# Altium integrated library GPDSE.IntLib: 426 symbols (part 5 of 5)
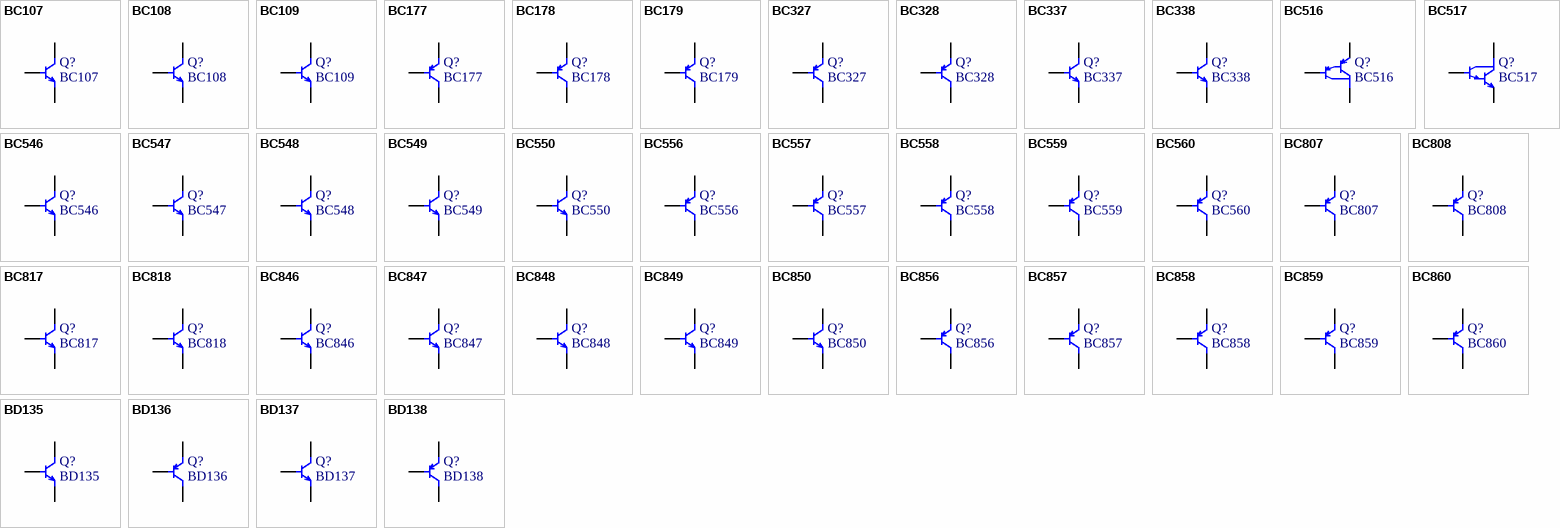
[diagram p30: symbols BC107 to BD138]

## BC109
designator Q?
NPN Bipolar Transistor; Complementary Part: BC179; Collector-Base Voltage (Vcb): 30 V; Collector-Emitter Voltage (Vce): 20 V; Emitter-Base Voltage (Veb): 5 V; Collector Current (Ic): 100 mA; Collector Peak Current (Icp): 200 mA; Total Power Dissipation (Ptot): 300 mW; DC Current Gain Min (hfe): 200; DC Current Gain Max (hfe): 800; Transition Frequency (fT): 100 MHz; Base Peak Current (Ibp): 200 mA
footprint TO-18/EBC (Transistor EBC)
pins: B, C, E

## BC177
designator Q?
PNP Bipolar Transistor; Complementary Part: BC107; Collector-Base Voltage (Vcb): -50 V; Collector-Emitter Voltage (Vce): -45 V; Emitter-Base Voltage (Veb): -5 V; Collector Current (Ic): -100 mA; Collector Peak Current (Icp): -200 mA; Total Power Dissipation (Ptot): 300 mW; DC Current Gain Min (hfe): 125; DC Current Gain Max (hfe): 500; Transition Frequency (fT): 100 MHz; Base Peak Current (Ibp): -200 mA
footprint TO-18/EBC (Transistor EBC)
pins: B, C, E

## BC178
designator Q?
PNP Bipolar Transistor; Complementary Part: BC108; Collector-Base Voltage (Vcb): -30 V; Collector-Emitter Voltage (Vce): -25 V; Emitter-Base Voltage (Veb): -5 V; Collector Current (Ic): -100 mA; Collector Peak Current (Icp): -200 mA; Total Power Dissipation (Ptot): 300 mW; DC Current Gain Min (hfe): 125; DC Current Gain Max (hfe): 500; Transition Frequency (fT): 100 MHz; Base Peak Current (Ibp): -100 mA
footprint TO-18/EBC (Transistor EBC)
pins: B, C, E

## BC179
designator Q?
PNP Bipolar Transistor; Complementary Part: BC109; Collector-Base Voltage (Vcb): -30 V; Collector-Emitter Voltage (Vce): -25 V; Emitter-Base Voltage (Veb): -5 V; Collector Current (Ic): -100 mA; Collector Peak Current (Icp): -200 mA; Total Power Dissipation (Ptot): 300 mW; DC Current Gain Min (hfe): 125; DC Current Gain Max (hfe): 500; Transition Frequency (fT): 100 MHz; Base Peak Current (Ibp): -100 mA
footprint TO-18/EBC (Transistor EBC)
pins: B, C, E

## BC327
designator Q?
PNP Epitaxial Silicon Transistor; Complementary Part: BC337; Collector-Emitter Voltage (Vce): -50 V; Emitter-Base Voltage (Veb): -5 V; Collector Current (Ic): -800 mA; Total Power Dissipation (Ptot): 625 mW; DC Current Gain Min (hfe): 100; DC Current Gain Max (hfe): 630; Transition Frequency (fT): 100 MHz
footprint TO-92/CBE (Transistor Outline Package, Case Style 92 CBE; 3D Sergey Atanov)
pins: B, C, E

## BC328
designator Q?
PNP Epitaxial Silicon Transistor; Complementary Part: BC338; Collector-Emitter Voltage (Vce): -30 V; Emitter-Base Voltage (Veb): -5 V; Collector Current (Ic): -800 mA; Total Power Dissipation (Ptot): 625 mW; DC Current Gain Min (hfe): 40; DC Current Gain Max (hfe): 630; Transition Frequency (fT): 100 MHz
footprint TO-92/CBE (Transistor Outline Package, Case Style 92 CBE; 3D Sergey Atanov)
pins: B, C, E

## BC337
designator Q?
NPN Epitaxial Silicon Transistor; Complementary Part: BC327; Collector-Emitter Voltage (Vce): 50 V; Emitter-Base Voltage (Veb): 5 V; Collector Current (Ic): 800 mA; Total Power Dissipation (Ptot): 625 mW; DC Current Gain Min (hfe): 100; DC Current Gain Max (hfe): 630; Transition Frequency (fT): 100 MHz
footprint TO-92/CBE (Transistor Outline Package, Case Style 92 CBE; 3D Sergey Atanov)
pins: B, C, E

## BC338
designator Q?
NPN Epitaxial Silicon Transistor; Complementary Part: BC328; Collector-Emitter Voltage (Vce): 30 V; Emitter-Base Voltage (Veb): 5 V; Collector Current (Ic): 800 mA; Total Power Dissipation (Ptot): 625 mW; DC Current Gain Min (hfe): 60; DC Current Gain Max (hfe): 630; Transition Frequency (fT): 100 MHz
footprint TO-92/CBE (Transistor Outline Package, Case Style 92 CBE; 3D Sergey Atanov)
pins: B, C, E

## BC516
designator Q?
PNP Darlington Transistor; Complementary Part: BC517; Collector-Emitter Voltage (Vce): -30 V; Collector-Base Voltage (Vcb): -40 V; Emitter-Base Voltage (Veb): -10 V; DC Current Gain Min (hfe): 30.000; Power Dissipation (Pd): 625 mW; Transition Frequency (fT): 200 MHz; Collector Current (Ic): -1 A
footprint TO-92/CBE (Transistor Outline Package, Case Style 92 CBE; 3D Sergey Atanov)
pins: B, C, E

## BC517
designator Q?
NPN Darlington Transistor; Complementary Part: BC516; Collector-Emitter Voltage (Vce): 30 V; Collector-Base Voltage (Vcb): 40 V; Emitter-Base Voltage (Veb): 10 V; DC Current Gain Min (hfe): 30.000; Power Dissipation (Pd): 625 mW; Collector Current (Ic): 1.2 A
footprint TO-92/CBE (Transistor Outline Package, Case Style 92 CBE; 3D Sergey Atanov)
pins: B, C, E

## BC546
designator Q?
NPN Epitaxial Silicon Transistor; Complementary Part: BC556; Collector-Base Voltage (Vcb): 80 V; Collector-Emitter Voltage (Vce): 65 V; Emitter-Base Voltage (Veb): 6 V; Collector Current (Ic): 100 mA; Total Power Dissipation (Ptot): 500 mW; DC Current Gain Min (hfe): 110; DC Current Gain Max (hfe): 800; Transition Frequency (fT): 300 MHz
footprint TO-92/CBE (Transistor Outline Package, Case Style 92 CBE; 3D Sergey Atanov)
pins: B, C, E

## BC547
designator Q?
NPN Epitaxial Silicon Transistor; Complementary Part: BC557; Collector-Base Voltage (Vcb): 50 V; Collector-Emitter Voltage (Vce): 45 V; Emitter-Base Voltage (Veb): 6 V; Collector Current (Ic): 100 mA; Total Power Dissipation (Ptot): 500 mW; DC Current Gain Min (hfe): 110; DC Current Gain Max (hfe): 800; Transition Frequency (fT): 300 MHz
footprint TO-92/CBE (Transistor Outline Package, Case Style 92 CBE; 3D Sergey Atanov)
pins: B, C, E

## BC548
designator Q?
NPN Epitaxial Silicon Transistor; Complementary Part: BC558; Collector-Base Voltage (Vcb): 30 V; Emitter-Base Voltage (Veb): 5 V; Collector Current (Ic): 100 mA; Total Power Dissipation (Ptot): 500 mW; DC Current Gain Min (hfe): 110; DC Current Gain Max (hfe): 800; Transition Frequency (fT): 300 MHz; Collector-Emitter Voltage (Vce): 30 V
footprint TO-92/CBE (Transistor Outline Package, Case Style 92 CBE; 3D Sergey Atanov)
pins: B, C, E

## BC549
designator Q?
NPN Epitaxial Silicon Transistor; Complementary Part: BC559; Collector-Base Voltage (Vcb): 30 V; Emitter-Base Voltage (Veb): 5 V; Collector Current (Ic): 100 mA; Total Power Dissipation (Ptot): 500 mW; DC Current Gain Min (hfe): 110; DC Current Gain Max (hfe): 800; Transition Frequency (fT): 300 MHz; Collector-Emitter Voltage (Vce): 30 V
footprint TO-92/CBE (Transistor Outline Package, Case Style 92 CBE; 3D Sergey Atanov)
pins: B, C, E

## BC550
designator Q?
NPN Epitaxial Silicon Transistor; Complementary Part: BC560; Collector-Base Voltage (Vcb): 50 V; Collector-Emitter Voltage (Vce): 45 V; Emitter-Base Voltage (Veb): 5 V; Collector Current (Ic): 100 mA; Total Power Dissipation (Ptot): 500 mW; DC Current Gain Min (hfe): 110; DC Current Gain Max (hfe): 800; Transition Frequency (fT): 300 MHz
footprint TO-92/CBE (Transistor Outline Package, Case Style 92 CBE; 3D Sergey Atanov)
pins: B, C, E

## BC556
designator Q?
PNP Epitaxial Silicon Transistor; Complementary Part: BC546; Collector-Base Voltage (Vcb): -80 V; Collector-Emitter Voltage (Vce): -65 V; Emitter-Base Voltage (Veb): -5 V; Collector Current (Ic): -100 mA; Total Power Dissipation (Ptot): 500 mW; DC Current Gain Min (hfe): 110; DC Current Gain Max (hfe): 800; Transition Frequency (fT): 150 MHz
footprint TO-92/CBE (Transistor Outline Package, Case Style 92 CBE; 3D Sergey Atanov)
pins: B, C, E

## BC557
designator Q?
PNP Epitaxial Silicon Transistor; Complementary Part: BC547; Collector-Base Voltage (Vcb): -50 V; Collector-Emitter Voltage (Vce): -45 V; Emitter-Base Voltage (Veb): -5 V; Collector Current (Ic): -100 mA; Total Power Dissipation (Ptot): 500 mW; DC Current Gain Min (hfe): 110; DC Current Gain Max (hfe): 800; Transition Frequency (fT): 150 MHz
footprint TO-92/CBE (Transistor Outline Package, Case Style 92 CBE; 3D Sergey Atanov)
pins: B, C, E

## BC558
designator Q?
PNP Epitaxial Silicon Transistor; Complementary Part: BC548; Collector-Base Voltage (Vcb): -30 V; Emitter-Base Voltage (Veb): -5 V; Collector Current (Ic): -100 mA; Total Power Dissipation (Ptot): 500 mW; DC Current Gain Min (hfe): 110; DC Current Gain Max (hfe): 800; Transition Frequency (fT): 150 MHz; Collector-Emitter Voltage (Vce): -30 V
footprint TO-92/CBE (Transistor Outline Package, Case Style 92 CBE; 3D Sergey Atanov)
pins: B, C, E

## BC559
designator Q?
PNP Epitaxial Silicon Transistor; Complementary Part: BC549; Collector-Base Voltage (Vcb): -30 V; Emitter-Base Voltage (Veb): -5 V; Collector Current (Ic): -100 mA; Total Power Dissipation (Ptot): 500 mW; DC Current Gain Min (hfe): 110; DC Current Gain Max (hfe): 800; Transition Frequency (fT): 150 MHz; Collector-Emitter Voltage (Vce): -30 V
footprint TO-92/CBE (Transistor Outline Package, Case Style 92 CBE; 3D Sergey Atanov)
pins: B, C, E

## BC560
designator Q?
PNP Epitaxial Silicon Transistor; Complementary Part: BC550; Collector-Base Voltage (Vcb): -50 V; Collector-Emitter Voltage (Vce): -45 V; Emitter-Base Voltage (Veb): -5 V; Collector Current (Ic): -100 mA; Total Power Dissipation (Ptot): 500 mW; DC Current Gain Min (hfe): 110; DC Current Gain Max (hfe): 800; Transition Frequency (fT): 150 MHz
footprint TO-92/CBE (Transistor Outline Package, Case Style 92 CBE; 3D Sergey Atanov)
pins: B, C, E

## BC807
designator Q?
PNP Epitaxial Silicon Transistor; Complementary Part: BC817; Collector-Base Voltage (Vcb): -50 V; Collector-Emitter Voltage (Vce): -45 V; Emitter-Base Voltage (Veb): -5 V; Collector Current (Ic): -800 mA; Total Power Dissipation (Ptot): 310 mW; DC Current Gain Min (hfe): 60; DC Current Gain Max (hfe): 630; Transition Frequency (fT): 100 MHz
footprint SOT-23/3 (Small Outline Transistor 3 leads); pin to pad B>1 C>3 E>2
pins: B, C, E

## BC808
designator Q?
PNP Epitaxial Silicon Transistor; Complementary Part: BC818; Collector-Base Voltage (Vcb): -30 V; Collector-Emitter Voltage (Vce): -25 V; Emitter-Base Voltage (Veb): -5 V; Collector Current (Ic): -800 mA; Total Power Dissipation (Ptot): 310 mW; DC Current Gain Min (hfe): 60; DC Current Gain Max (hfe): 630; Transition Frequency (fT): 100 MHz
footprint SOT-23/3 (Small Outline Transistor 3 leads); pin to pad B>1 C>3 E>2
pins: B, C, E

## BC817
designator Q?
NPN Epitaxial Silicon Transistor; Complementary Part: BC807; Collector-Base Voltage (Vcb): 50 V; Collector-Emitter Voltage (Vce): 45 V; Emitter-Base Voltage (Veb): 5 V; Collector Current (Ic): 800 mA; Total Power Dissipation (Ptot): 310 mW; DC Current Gain Min (hfe): 60; DC Current Gain Max (hfe): 630; Transition Frequency (fT): 100 MHz
footprint SOT-23/3 (Small Outline Transistor 3 leads); pin to pad B>1 C>3 E>2
pins: B, C, E

## BC818
designator Q?
NPN Epitaxial Silicon Transistor; Complementary Part: BC808; Collector-Base Voltage (Vcb): 30 V; Collector-Emitter Voltage (Vce): 25 V; Emitter-Base Voltage (Veb): 5 V; Collector Current (Ic): 800 mA; Total Power Dissipation (Ptot): 310 mW; DC Current Gain Min (hfe): 60; DC Current Gain Max (hfe): 630; Transition Frequency (fT): 100 MHz
footprint SOT-23/3 (Small Outline Transistor 3 leads); pin to pad B>1 C>3 E>2
pins: B, C, E

## BC846
designator Q?
NPN Epitaxial Silicon Transistor; Complementary Part: BC856; Collector-Base Voltage (Vcb): 80 V; Collector-Emitter Voltage (Vce): 65 V; Emitter-Base Voltage (Veb): 6 V; Collector Current (Ic): 100 mA; Total Power Dissipation (Ptot): 310 mW; DC Current Gain Min (hfe): 110; DC Current Gain Max (hfe): 800; Transition Frequency (fT): 300 MHz
footprint SOT-23/3 (Small Outline Transistor 3 leads); pin to pad B>1 C>3 E>2
pins: B, C, E

## BC847
designator Q?
NPN Epitaxial Silicon Transistor; Complementary Part: BC857; Collector-Base Voltage (Vcb): 50 V; Collector-Emitter Voltage (Vce): 45 V; Emitter-Base Voltage (Veb): 6 V; Collector Current (Ic): 100 mA; Total Power Dissipation (Ptot): 310 mW; DC Current Gain Min (hfe): 110; DC Current Gain Max (hfe): 800; Transition Frequency (fT): 300 MHz
footprint SOT-23/3 (Small Outline Transistor 3 leads); pin to pad B>1 C>3 E>2
pins: B, C, E

## BC848
designator Q?
NPN Epitaxial Silicon Transistor; Complementary Part: BC858; Collector-Base Voltage (Vcb): 30 V; Emitter-Base Voltage (Veb): 5 V; Collector Current (Ic): 100 mA; Total Power Dissipation (Ptot): 310 mW; DC Current Gain Min (hfe): 110; DC Current Gain Max (hfe): 800; Transition Frequency (fT): 300 MHz; Collector-Emitter Voltage (Vce): 30 V
footprint SOT-23/3 (Small Outline Transistor 3 leads); pin to pad B>1 C>3 E>2
pins: B, C, E

## BC849
designator Q?
NPN Epitaxial Silicon Transistor; Complementary Part: BC859; Collector-Base Voltage (Vcb): 30 V; Emitter-Base Voltage (Veb): 5 V; Collector Current (Ic): 100 mA; Total Power Dissipation (Ptot): 310 mW; DC Current Gain Min (hfe): 110; DC Current Gain Max (hfe): 800; Transition Frequency (fT): 300 MHz; Collector-Emitter Voltage (Vce): 30 V
footprint SOT-23/3 (Small Outline Transistor 3 leads); pin to pad B>1 C>3 E>2
pins: B, C, E

## BC850
designator Q?
NPN Epitaxial Silicon Transistor; Complementary Part: BC860; Collector-Base Voltage (Vcb): 50 V; Collector-Emitter Voltage (Vce): 45 V; Emitter-Base Voltage (Veb): 5 V; Collector Current (Ic): 100 mA; Total Power Dissipation (Ptot): 310 mW; DC Current Gain Min (hfe): 110; DC Current Gain Max (hfe): 800; Transition Frequency (fT): 300 MHz
footprint SOT-23/3 (Small Outline Transistor 3 leads); pin to pad B>1 C>3 E>2
pins: B, C, E

## BC856
designator Q?
PNP Epitaxial Silicon Transistor; Complementary Part: BC846; Collector-Base Voltage (Vcb): -80 V; Collector-Emitter Voltage (Vce): -65 V; Emitter-Base Voltage (Veb): -5 V; Collector Current (Ic): -100 mA; Total Power Dissipation (Ptot): 310 mW; DC Current Gain Min (hfe): 110; DC Current Gain Max (hfe): 800; Transition Frequency (fT): 150 MHz
footprint SOT-23/3 (Small Outline Transistor 3 leads); pin to pad B>1 C>3 E>2
pins: B, C, E

## BC857
designator Q?
PNP Epitaxial Silicon Transistor; Complementary Part: BC847; Collector-Base Voltage (Vcb): -50 V; Collector-Emitter Voltage (Vce): -45 V; Emitter-Base Voltage (Veb): -5 V; Collector Current (Ic): -100 mA; Total Power Dissipation (Ptot): 310 mW; DC Current Gain Min (hfe): 110; DC Current Gain Max (hfe): 800; Transition Frequency (fT): 150 MHz
footprint SOT-23/3 (Small Outline Transistor 3 leads); pin to pad B>1 C>3 E>2
pins: B, C, E

## BC858
designator Q?
PNP Epitaxial Silicon Transistor; Complementary Part: BC848; Collector-Base Voltage (Vcb): -30 V; Emitter-Base Voltage (Veb): -5 V; Collector Current (Ic): -100 mA; Total Power Dissipation (Ptot): 310 mW; DC Current Gain Min (hfe): 110; DC Current Gain Max (hfe): 800; Transition Frequency (fT): 150 MHz; Collector-Emitter Voltage (Vce): -30 V
footprint SOT-23/3 (Small Outline Transistor 3 leads); pin to pad B>1 C>3 E>2
pins: B, C, E

## BC859
designator Q?
PNP Epitaxial Silicon Transistor; Complementary Part: BC849; Collector-Base Voltage (Vcb): -30 V; Emitter-Base Voltage (Veb): -5 V; Collector Current (Ic): -100 mA; Total Power Dissipation (Ptot): 310 mW; DC Current Gain Min (hfe): 110; DC Current Gain Max (hfe): 800; Transition Frequency (fT): 150 MHz; Collector-Emitter Voltage (Vce): -30 V
footprint SOT-23/3 (Small Outline Transistor 3 leads); pin to pad B>1 C>3 E>2
pins: B, C, E

## BC860
designator Q?
PNP Epitaxial Silicon Transistor; Complementary Part: BC850; Collector-Base Voltage (Vcb): -50 V; Collector-Emitter Voltage (Vce): -45 V; Emitter-Base Voltage (Veb): -5 V; Collector Current (Ic): -100 mA; Total Power Dissipation (Ptot): 310 mW; DC Current Gain Min (hfe): 110; DC Current Gain Max (hfe): 800; Transition Frequency (fT): 150 MHz
footprint SOT-23/3 (Small Outline Transistor 3 leads); pin to pad B>1 C>3 E>2
pins: B, C, E

## BD135
designator Q?
NPN Epitaxial Silicon Transistor; Complementary Part: BD136; Collector-Base Voltage (Vcb): 45 V; Emitter-Base Voltage (Veb): 5 V; Collector Current (Ic): 1.5 A; Collector Peak Current (Icp): 3 A; Base Peak Current (Ibp): 0.5 A; Total Power Dissipation (Ptot): 12.5 W; DC Current Gain Min (hfe): 25; DC Current Gain Max (hfe): 250; Collector-Emitter Voltage (Vce): 45 V
footprint TO-126/ECB
pins: B, C, E

## BD136
designator Q?
PNP Epitaxial Silicon Transistor; Collector-Base Voltage (Vcb): -45 V; Emitter-Base Voltage (Veb): -5 V; Collector Current (Ic): -1.5 A; Collector Peak Current (Icp): -3 A; Base Peak Current (Ibp): -0.5 A; Total Power Dissipation (Ptot): 12.5 W; DC Current Gain Min (hfe): 25; DC Current Gain Max (hfe): 250; Collector-Emitter Voltage (Vce): -45 V; Complementary Part: BD136
footprint TO-126/ECB
pins: B, C, E

## BD137
designator Q?
NPN Epitaxial Silicon Transistor; Complementary Part: BD138; Collector-Base Voltage (Vcb): 60 V; Emitter-Base Voltage (Veb): 5 V; Collector Current (Ic): 1.5 A; Collector Peak Current (Icp): 3 A; Base Peak Current (Ibp): 0.5 A; Total Power Dissipation (Ptot): 12.5 W; DC Current Gain Min (hfe): 25; DC Current Gain Max (hfe): 250; Collector-Emitter Voltage (Vce): 60 V
footprint TO-126/ECB
pins: B, C, E

## BD138
designator Q?
PNP Epitaxial Silicon Transistor; Collector-Base Voltage (Vcb): -60 V; Emitter-Base Voltage (Veb): -5 V; Collector Current (Ic): -1.5 A; Collector Peak Current (Icp): -3 A; Base Peak Current (Ibp): -0.5 A; Total Power Dissipation (Ptot): 12.5 W; DC Current Gain Min (hfe): 25; DC Current Gain Max (hfe): 250; Collector-Emitter Voltage (Vce): -60 V; Complementary Part: BD138
footprint TO-126/ECB
pins: B, C, E

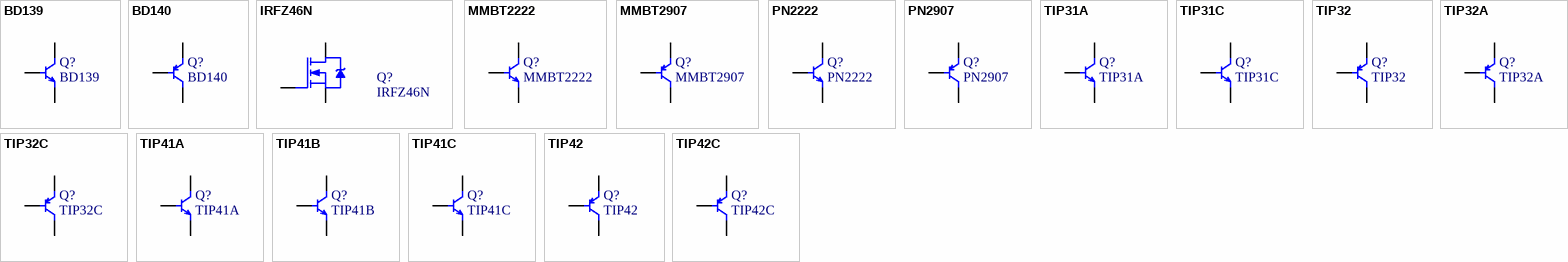
[diagram p19: symbols BD139 to TIP42C]

## BD139
designator Q?
NPN Epitaxial Silicon Transistor; Complementary Part: BD140; Collector-Base Voltage (Vcb): 80 V; Emitter-Base Voltage (Veb): 5 V; Collector Current (Ic): 1.5 A; Collector Peak Current (Icp): 3 A; Base Peak Current (Ibp): 0.5 A; Total Power Dissipation (Ptot): 12.5 W; DC Current Gain Min (hfe): 25; DC Current Gain Max (hfe): 250; Collector-Emitter Voltage (Vce): 80 V
footprint TO-126/ECB
pins: B, C, E

## BD140
designator Q?
PNP Epitaxial Silicon Transistor; Collector-Base Voltage (Vcb): -80 V; Emitter-Base Voltage (Veb): -5 V; Collector Current (Ic): -1.5 A; Collector Peak Current (Icp): -3 A; Base Peak Current (Ibp): -0.5 A; Total Power Dissipation (Ptot): 12.5 W; DC Current Gain Min (hfe): 25; DC Current Gain Max (hfe): 250; Collector-Emitter Voltage (Vce): -80 V; Complementary Part: BD140
footprint TO-126/ECB
pins: B, C, E

## IRFZ46N
designator Q?
HEXFET Power MOSFET; Drain Current (Id): 53 A; Drain Current Peak (Idp): 180 A; Power Dissipation (Pd): 107 W; Gate-to-Source Voltage (Vgs): 20 V; Static Drain-to-Source On-Resistance (Rdson): 16.5 mR; Turn-On Delay (tdon): 14 ns; Rise Time (Rt): 76 ns; Fall Time (Tf): 57 ns; Turn-Off Delay (Tdoff): 52 ns
footprint TO-220/123 (TO, Thru-Hole, Vertical, Heatsink Mounted; 3 In-Line Leads; Pitch 2.54 mm); pin to pad D>2 G>1 S>3
pins: D, G, S

## MMBT2222
designator Q?
NPN Epitaxial Silicon Transistor; Complementary Part: MMBT2907; Collector-Base Voltage (Vcb): 60 V; Collector-Emitter Voltage (Vce): 30 V; Emitter-Base Voltage (Veb): 5 V; Collector Current (Ic): 600 mA; Total Power Dissipation (Ptot): 350 mW; DC Current Gain Min (hfe): 35; DC Current Gain Max (hfe): 300; Transition Frequency (fT): 300 MHz
footprint SOT-23/3 (Small Outline Transistor 3 leads); pin to pad B>1 C>3 E>2
pins: B, C, E

## MMBT2907
designator Q?
PNP Epitaxial Silicon Transistor; Complementary Part: MMBT2222; Collector-Base Voltage (Vcb): -60 V; Collector-Emitter Voltage (Vce): -40 V; Emitter-Base Voltage (Veb): -5 V; Collector Current (Ic): -800 mA; Total Power Dissipation (Ptot): 350 mW; DC Current Gain Min (hfe): 30; DC Current Gain Max (hfe): 300; Transition Frequency (fT): 300 MHz
footprint SOT-23/3 (Small Outline Transistor 3 leads); pin to pad B>1 C>3 E>2
pins: B, C, E

## PN2222
designator Q?
NPN Epitaxial Silicon Transistor; Complementary Part: PN2907; Collector-Base Voltage (Vcb): 60 V; Collector-Emitter Voltage (Vce): 30 V; Emitter-Base Voltage (Veb): 5 V; Collector Current (Ic): 600 mA; Total Power Dissipation (Ptot): 625 mW; DC Current Gain Min (hfe): 35; DC Current Gain Max (hfe): 300; Transition Frequency (fT): 300 MHz
footprint TO-92/EBC (Transistor Outline Package, Case Style 92 EBC; 3D Sergey Atanov)
pins: B, C, E

## PN2907
designator Q?
PNP Epitaxial Silicon Transistor; Complementary Part: PN2222; Collector-Base Voltage (Vcb): -60 V; Collector-Emitter Voltage (Vce): -40 V; Emitter-Base Voltage (Veb): -5 V; Collector Current (Ic): -800 mA; Total Power Dissipation (Ptot): 625 mW; DC Current Gain Min (hfe): 30; DC Current Gain Max (hfe): 300; Transition Frequency (fT): 300 MHz
footprint TO-92/EBC (Transistor Outline Package, Case Style 92 EBC; 3D Sergey Atanov)
pins: B, C, E

## TIP31A
designator Q?
NPN Epitaxial Silicon Transistor; Complementary Part: TIP32A; Collector-Base Voltage (Vcb): 60 V; Emitter-Base Voltage (Veb): 5 V; Collector Current (Ic): 3 A; Collector Peak Current (Icp): 5 A; Base Peak Current (Ibp): 1 A; Total Power Dissipation (Ptot): 40 W; DC Current Gain Min (hfe): 10; DC Current Gain Max (hfe): 50; Transition Frequency (fT): 3 MHz; Collector-Emitter Voltage (Vce): 60 V
footprint TO-220/BCE (TO, Thru-Hole, Vertical, Heatsink Mounted; 3 In-Line Leads; Pitch 2.54 mm)
pins: B, C, E

## TIP31C
designator Q?
NPN Epitaxial Silicon Transistor; Complementary Part: TIP32C; Collector-Base Voltage (Vcb): 100 V; Emitter-Base Voltage (Veb): 5 V; Collector Current (Ic): 3 A; Collector Peak Current (Icp): 5 A; Base Peak Current (Ibp): 1 A; Total Power Dissipation (Ptot): 40 W; DC Current Gain Min (hfe): 10; DC Current Gain Max (hfe): 50; Transition Frequency (fT): 3 MHz; Collector-Emitter Voltage (Vce): 100 V
footprint TO-220/BCE (TO, Thru-Hole, Vertical, Heatsink Mounted; 3 In-Line Leads; Pitch 2.54 mm)
pins: B, C, E

## TIP32
designator Q?
PNP Epitaxial Silicon Transistor; Complementary Part: TIP31; Collector-Base Voltage (Vcb): -40 V; Emitter-Base Voltage (Veb): -5 V; Collector Current (Ic): -3 A; Collector Peak Current (Icp): -5 A; Total Power Dissipation (Ptot): 40 W; DC Current Gain Min (hfe): 10; DC Current Gain Max (hfe): 50; Transition Frequency (fT): 3 MHz; Collector-Emitter Voltage (Vce): -40 V; Base Peak Current (Ibp): -3 A
footprint TO-220/BCE (TO, Thru-Hole, Vertical, Heatsink Mounted; 3 In-Line Leads; Pitch 2.54 mm)
pins: B, C, E

## TIP32A
designator Q?
PNP Epitaxial Silicon Transistor; Complementary Part: TIP31A; Collector-Base Voltage (Vcb): -60 V; Emitter-Base Voltage (Veb): -5 V; Collector Current (Ic): -3 A; Collector Peak Current (Icp): -5 A; Total Power Dissipation (Ptot): 40 W; DC Current Gain Min (hfe): 10; DC Current Gain Max (hfe): 50; Transition Frequency (fT): 3 MHz; Collector-Emitter Voltage (Vce): -60 V; Base Peak Current (Ibp): -3 A
footprint TO-220/BCE (TO, Thru-Hole, Vertical, Heatsink Mounted; 3 In-Line Leads; Pitch 2.54 mm)
pins: B, C, E

## TIP32C
designator Q?
PNP Epitaxial Silicon Transistor; Complementary Part: TIP31C; Collector-Base Voltage (Vcb): -100 V; Emitter-Base Voltage (Veb): -5 V; Collector Current (Ic): -3 A; Collector Peak Current (Icp): -5 A; Total Power Dissipation (Ptot): 40 W; DC Current Gain Min (hfe): 10; DC Current Gain Max (hfe): 50; Transition Frequency (fT): 3 MHz; Collector-Emitter Voltage (Vce): -100 V; Base Peak Current (Ibp): -3 A
footprint TO-220/BCE (TO, Thru-Hole, Vertical, Heatsink Mounted; 3 In-Line Leads; Pitch 2.54 mm)
pins: B, C, E

## TIP41A
designator Q?
NPN Epitaxial Silicon Transistor; Complementary Part: TIP42A; Collector-Base Voltage (Vcb): 60 V; Emitter-Base Voltage (Veb): 5 V; Collector Current (Ic): 6 A; Collector Peak Current (Icp): 10 A; Base Peak Current (Ibp): 2 A; Total Power Dissipation (Ptot): 65 W; DC Current Gain Min (hfe): 15; DC Current Gain Max (hfe): 75; Transition Frequency (fT): 3 MHz; Collector-Emitter Voltage (Vce): 60 V
footprint TO-220/BCE (TO, Thru-Hole, Vertical, Heatsink Mounted; 3 In-Line Leads; Pitch 2.54 mm)
pins: B, C, E

## TIP41B
designator Q?
NPN Epitaxial Silicon Transistor; Complementary Part: TIP42B; Collector-Base Voltage (Vcb): 80 V; Emitter-Base Voltage (Veb): 5 V; Collector Current (Ic): 6 A; Collector Peak Current (Icp): 10 A; Base Peak Current (Ibp): 2 A; Total Power Dissipation (Ptot): 65 W; DC Current Gain Min (hfe): 15; DC Current Gain Max (hfe): 75; Transition Frequency (fT): 3 MHz; Collector-Emitter Voltage (Vce): 80 V
footprint TO-220/BCE (TO, Thru-Hole, Vertical, Heatsink Mounted; 3 In-Line Leads; Pitch 2.54 mm)
pins: B, C, E

## TIP41C
designator Q?
NPN Epitaxial Silicon Transistor; Complementary Part: TIP42C; Collector-Base Voltage (Vcb): 100 V; Emitter-Base Voltage (Veb): 5 V; Collector Current (Ic): 6 A; Collector Peak Current (Icp): 10 A; Base Peak Current (Ibp): 2 A; Total Power Dissipation (Ptot): 65 W; DC Current Gain Min (hfe): 15; DC Current Gain Max (hfe): 75; Transition Frequency (fT): 3 MHz; Collector-Emitter Voltage (Vce): 100 V
footprint TO-220/BCE (TO, Thru-Hole, Vertical, Heatsink Mounted; 3 In-Line Leads; Pitch 2.54 mm)
pins: B, C, E

## TIP42
designator Q?
PNP Epitaxial Silicon Transistor; Complementary Part: TIP41; Collector-Base Voltage (Vcb): -40 V; Emitter-Base Voltage (Veb): -5 V; Collector Current (Ic): -6 A; Collector Peak Current (Icp): -10 A; Base Peak Current (Ibp): -2 A; Total Power Dissipation (Ptot): 65 W; DC Current Gain Min (hfe): 15; DC Current Gain Max (hfe): 75; Transition Frequency (fT): 3 MHz; Collector-Emitter Voltage (Vce): -40 V
footprint TO-220/BCE (TO, Thru-Hole, Vertical, Heatsink Mounted; 3 In-Line Leads; Pitch 2.54 mm)
pins: B, C, E

## TIP42C
designator Q?
PNP Epitaxial Silicon Transistor; Complementary Part: TIP41C; Collector-Base Voltage (Vcb): -100 V; Emitter-Base Voltage (Veb): -5 V; Collector Current (Ic): -6 A; Collector Peak Current (Icp): -10 A; Base Peak Current (Ibp): -2 A; Total Power Dissipation (Ptot): 65 W; DC Current Gain Min (hfe): 15; DC Current Gain Max (hfe): 75; Transition Frequency (fT): 3 MHz; Collector-Emitter Voltage (Vce): -100 V
footprint TO-220/BCE (TO, Thru-Hole, Vertical, Heatsink Mounted; 3 In-Line Leads; Pitch 2.54 mm)
pins: B, C, E


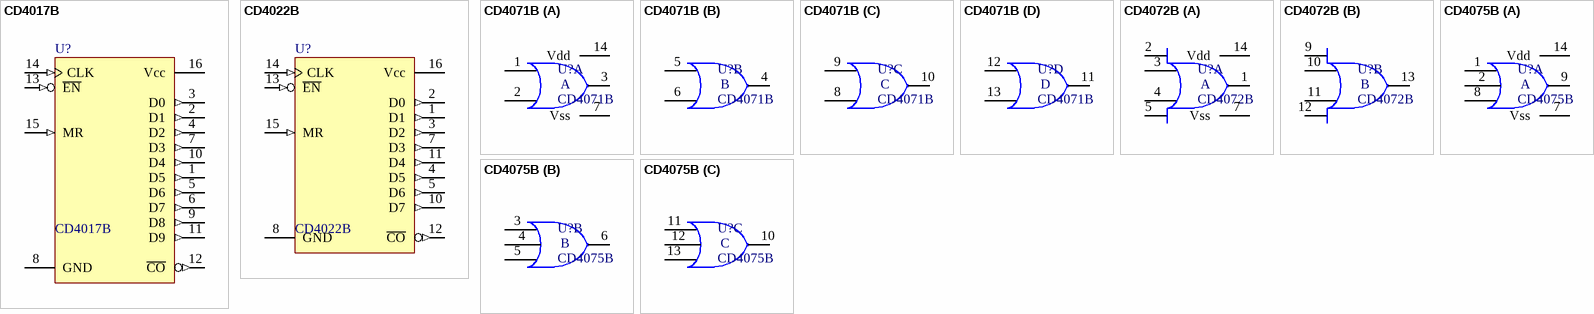
[diagram p20: symbols CD4017B to CD4075B]

## CD4017B
designator U?
CMOS Decade Counter with 10 Decoded Outputs; Supply Voltage (Vcc): 4.75 to 5.25 V; Input Voltage (Vi): 0 to Vcc; Output High Current (Ioh): -0.8 mA; Output Low Current (Iol): 16 mA; Clock Frequency (fclock): 20 MHz; Output Voltage (Vo): 0 to Vcc
footprint DIP16-300(100) (DIP, 16-Leads, Row Spacing 7.62mm, Pitch 2.54mm, Body 22.86x6.35mm)
footprint SOIC16-150(50) (SOIC 16 Leads; Row Spacing 3.81 mm; Pitch 1.27 mm; 3D André L´Hérault)
footprint SOP16-5.3mm(1.27mm) (Small Outline Package 16 pin)
footprint SOP16-4.4mm(0.65mm) (Thin Shrink Small Outline Package 16 pin)
pins: 1 D5 (out), 2 D1 (out), 3 D0 (out), 4 D2 (out), 5 D6 (out), 6 D7 (out), 7 D3 (out), 8 GND (power), 9 D8 (out), 10 D4 (out), 11 D9 (out), 12 ~{CO} (out), 13 ~{EN} (in), 14 CLK (in), 15 MR (in), 16 Vcc (power)

## CD4022B
designator U?
CMOS Octal Counter with 8 Decoded Outputs; Supply Voltage (Vcc): 4.75 to 5.25 V; Input Voltage (Vi): 0 to Vcc; Output High Current (Ioh): -0.8 mA; Output Low Current (Iol): 16 mA; Clock Frequency (fclock): 20 MHz; Output Voltage (Vo): 0 to Vcc
footprint DIP16-300(100) (DIP, 16-Leads, Row Spacing 7.62mm, Pitch 2.54mm, Body 22.86x6.35mm)
footprint SOP16-5.3mm(1.27mm) (Small Outline Package 16 pin)
footprint SOP16-4.4mm(0.65mm) (Thin Shrink Small Outline Package 16 pin)
pins: 1 D1 (out), 2 D0 (out), 3 D2 (out), 4 D5 (out), 5 D6 (out), 7 D3 (out), 8 GND (power), 10 D7 (out), 11 D4 (out), 12 ~{CO} (out), 13 ~{EN} (in), 14 CLK (in), 15 MR (in), 16 Vcc (power)

## CD4071B
designator U?
Quad 2-input OR Gates
footprint DIP14-300(100) (DIP; 14 Leads; Row Spacing 7.62 mm; Pitch 2.54 mm; 3D CircuitWorks)
footprint SOIC14-150(50) (SOIC; 14 Leads; Row Spacing 3.81 mm; Pitch 1.27 mm; 3D Antonio Fagaldo)
footprint SOP14-5.3mm(1.27mm) (Small Outline Package 14 pin)
footprint SOP14-4.4mm(0.65mm) (Thin Shrink Small Outline Package 14 pin)
part A pins: 1 A1, 2 B1, 3 Y1, 7 Vss, 14 Vdd
part B pins: 4 Y2, 5 A2, 6 B2
part C pins: 8 B3, 9 A3, 10 Y3
part D pins: 11 Y4, 12 A4, 13 B4
part A text: A
part B text: B
part C text: C
part D text: D

## CD4072B
designator U?
Dual 4-input OR Gates
footprint DIP14-300(100) (DIP; 14 Leads; Row Spacing 7.62 mm; Pitch 2.54 mm; 3D CircuitWorks)
footprint SOIC14-150(50) (SOIC; 14 Leads; Row Spacing 3.81 mm; Pitch 1.27 mm; 3D Antonio Fagaldo)
footprint SOP14-5.3mm(1.27mm) (Small Outline Package 14 pin)
footprint SOP14-4.4mm(0.65mm) (Thin Shrink Small Outline Package 14 pin)
part A pins: 1 Y1, 2 A1, 3 B1, 4 C1, 5 D1, 7 Vss, 14 Vdd
part B pins: 9 A2, 10 B2, 11 C2, 12 D2, 13 Y2
part A text: A
part B text: B

## CD4075B
designator U?
Triple 3-input OR Gates
footprint DIP14-300(100) (DIP; 14 Leads; Row Spacing 7.62 mm; Pitch 2.54 mm; 3D CircuitWorks)
footprint SOIC14-150(50) (SOIC; 14 Leads; Row Spacing 3.81 mm; Pitch 1.27 mm; 3D Antonio Fagaldo)
footprint SOP14-5.3mm(1.27mm) (Small Outline Package 14 pin)
footprint SOP14-4.4mm(0.65mm) (Thin Shrink Small Outline Package 14 pin)
part A pins: 1 A1, 2 B1, 7 Vss, 8 C1, 9 Y1, 14 Vdd
part B pins: 3 A2, 4 B2, 5 C2, 6 Y2
part C pins: 10 Y3, 11 A3, 12 B3, 13 C3
part A text: A
part B text: B
part C text: C


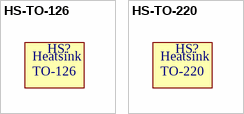
[diagram p21: symbols HS-TO-126 to HS-TO-220]

## HS-TO-126
designator HS?  (value not drawn)
Heatsink TO-126
footprint HS-TO-126-180847 (Heatsink TO-126 180847)
text: Heatsink; TO-126

## HS-TO-220
designator HS?  (value not drawn)
Heatsink TO-220
footprint HS-TO-220-180847 (Heatsink TO-220 180847 180847 19x9.5x19mm)
footprint HS-TO-220-183003-50 (Heatsink TO-220 183003-50 70x21x50mm)
footprint HS-TO-220-183004-37 (Heatsink TO-220 183004-37 86x20x37mm)
text: Heatsink; TO-220


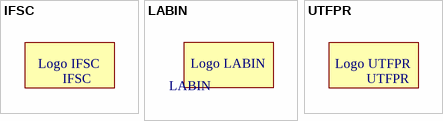
[diagram p22: symbols IFSC to UTFPR]

## IFSC
designator X?
Logomarca IFSC
footprint IFSC_SILK (Logomarca do IFSC)
footprint IFSC_BOTTOM (Logomarca do IFSC)
footprint IFSC_TOP (Logomarca do IFSC)
text: Logo IFSC

## LABIN
designator X?
Logomarca LABIN
footprint LABIN_SILK (Logomarca do LABIN)
footprint LABIN_BOTTOM (Logomarca do LABIN)
footprint LABIN_TOP (Logomarca do LABIN)
text: Logo LABIN

## UTFPR
designator X?
Logomarca UTFPR
footprint UTFPR_SILK (Logomarca da UTFPR)
footprint UTFPR_BOTTOM (Logomarca da UTFPR)
footprint UTFPR_TOP (Logomarca da UTFPR)
text: Logo UTFPR


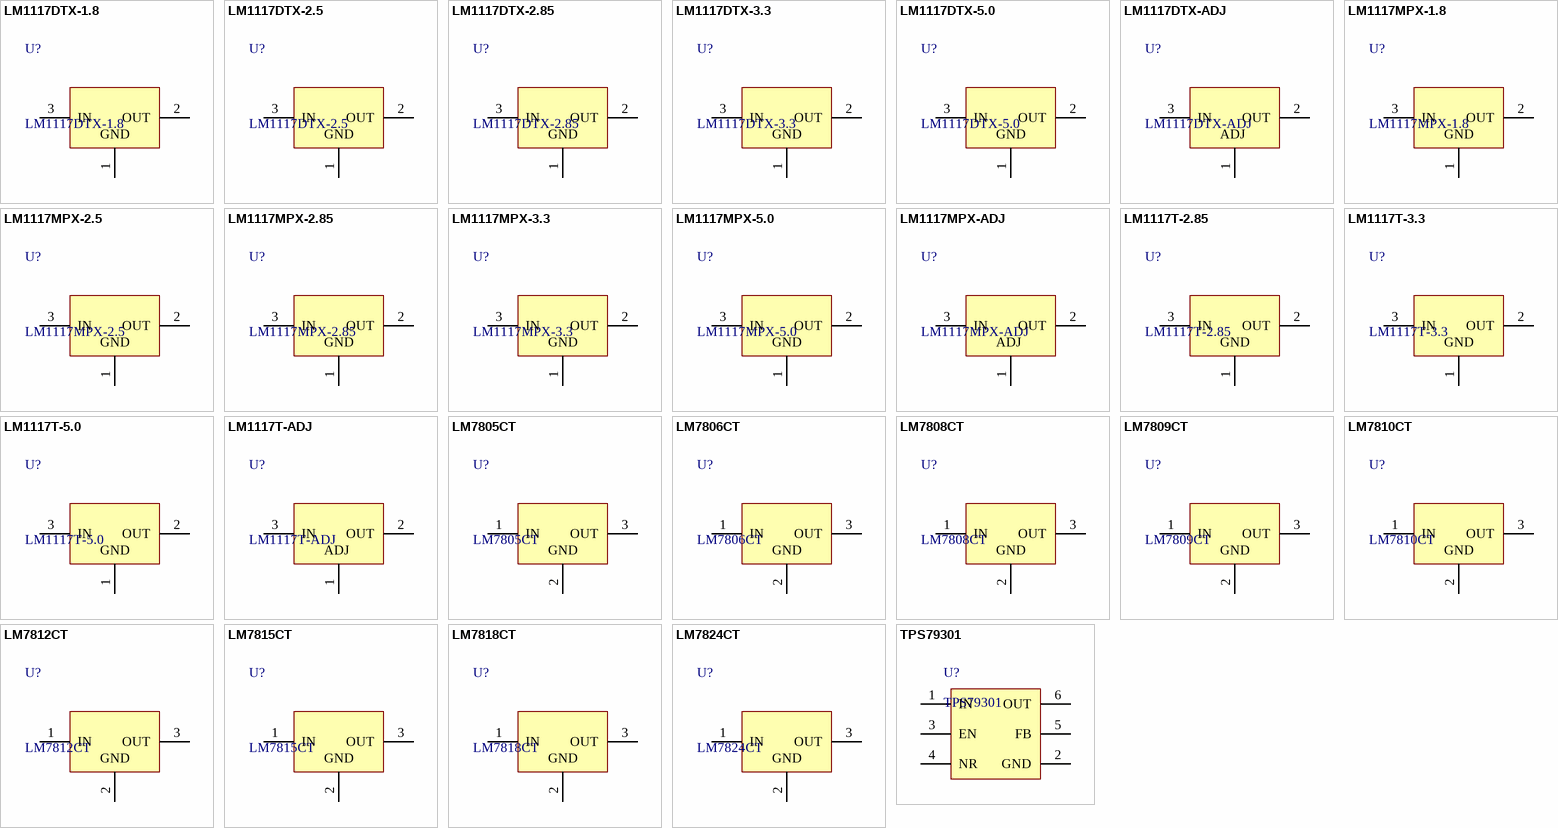
[diagram p23: symbols LM1117DTX-1.8 to TPS79301]

## LM1117DTX-1.8
designator U?
Positive 1.8 V Regulator
footprint TO-252/4 (PowerFLEX Plastic Flange-Mount)
pins: 1 GND, 2 OUT, 3 IN

## LM1117DTX-2.5
designator U?
Positive 2.5 V Regulator
footprint TO-252/4 (PowerFLEX Plastic Flange-Mount)
pins: 1 GND, 2 OUT, 3 IN

## LM1117DTX-2.85
designator U?
Positive 2.85 V Regulator
footprint TO-252/4 (PowerFLEX Plastic Flange-Mount)
pins: 1 GND, 2 OUT, 3 IN

## LM1117DTX-3.3
designator U?
Positive 3.3 V Regulator
footprint TO-252/4 (PowerFLEX Plastic Flange-Mount)
pins: 1 GND, 2 OUT, 3 IN

## LM1117DTX-5.0
designator U?
Positive 5 V Regulator
footprint TO-252/4 (PowerFLEX Plastic Flange-Mount)
pins: 1 GND, 2 OUT, 3 IN

## LM1117DTX-ADJ
designator U?
Positive Adjustable Regulator
footprint TO-252/4 (PowerFLEX Plastic Flange-Mount)
pins: 1 ADJ, 2 OUT, 3 IN

## LM1117MPX-1.8
designator U?
Positive 1.8 V Regulator
footprint SOT-223/4 (SOT-223 DCY)
pins: 1 GND, 2 OUT, 3 IN

## LM1117MPX-2.5
designator U?
Positive 2.5 V Regulator
footprint SOT-223/4 (SOT-223 DCY)
pins: 1 GND, 2 OUT, 3 IN

## LM1117MPX-2.85
designator U?
Positive 2.85 V Regulator
footprint SOT-223/4 (SOT-223 DCY)
pins: 1 GND, 2 OUT, 3 IN

## LM1117MPX-3.3
designator U?
Positive 3.3 V Regulator
footprint SOT-223/4 (SOT-223 DCY)
pins: 1 GND, 2 OUT, 3 IN

## LM1117MPX-5.0
designator U?
Positive 5 V Regulator
footprint SOT-223/4 (SOT-223 DCY)
pins: 1 GND, 2 OUT, 3 IN

## LM1117MPX-ADJ
designator U?
Positive Adjustable Regulator
footprint SOT-223/4 (SOT-223 DCY)
pins: 1 ADJ, 2 OUT, 3 IN

## LM1117T-2.85
designator U?
Positive 2.85 V Regulator
footprint TO-220/123 (TO, Thru-Hole, Vertical, Heatsink Mounted; 3 In-Line Leads; Pitch 2.54 mm)
pins: 1 GND, 2 OUT, 3 IN

## LM1117T-3.3
designator U?
Positive 3.3 V Regulator
footprint TO-220/123 (TO, Thru-Hole, Vertical, Heatsink Mounted; 3 In-Line Leads; Pitch 2.54 mm)
pins: 1 GND, 2 OUT, 3 IN

## LM1117T-5.0
designator U?
Positive 5 V Regulator
footprint TO-220/123 (TO, Thru-Hole, Vertical, Heatsink Mounted; 3 In-Line Leads; Pitch 2.54 mm)
pins: 1 GND, 2 OUT, 3 IN

## LM1117T-ADJ
designator U?
Positive Adjustable Regulator
footprint TO-220/123 (TO, Thru-Hole, Vertical, Heatsink Mounted; 3 In-Line Leads; Pitch 2.54 mm)
pins: 1 ADJ, 2 OUT, 3 IN

## LM7805CT
designator U?
Positive 5 V Regulator; Manufacturer: Fairchild Semiconductor; Regulator Topology: Positive Fixed; Voltage - Output: 5V; Current - Output: 1A; Voltage - Dropout (Typical): 2V @ 1A; Number of Regulators: 1; Voltage - Input: Up to 35V; Supplier 1: Digi-Key; Supplier Part Number 1: LM7805CT-ND; Manufacturer Part Number: LM7805CT; RoHS: RoHS Compliant; Category: Integrated Circuits (ICs); Stock 1: 50483; Pricing 1: 1=0.67, 10=0.566, 25=0.4956, 100=0.4248, 250=0.36816, 500=0.31152, 1000=0.24072, 2500=0.21948, 5000=0.20532 (USD); Packaging: Tube; Current - Limit (Min): -; Operating Temperature: -40°C ~ 125°C; Mounting Type: Through Hole; Package / Case: TO-220-3; Supplier Device Package: TO-220-3; ComponentLink1URL: http://www.fairchildsemi.com/datasheets/LM/LM7805.pdf; ComponentLink1Description: http://www.fairchildsemi.com/datasheets/LM/LM7805.pdf
footprint TO-220/123 (TO, Thru-Hole, Vertical, Heatsink Mounted; 3 In-Line Leads; Pitch 2.54 mm)
pins: 1 IN, 2 GND, 3 OUT

## LM7806CT
designator U?
Positive 6 V Regulator; Manufacturer: Fairchild Semiconductor; Regulator Topology: Positive Fixed; Voltage - Output: 6V; Current - Output: 1A; Voltage - Dropout (Typical): 2V @ 1A; Number of Regulators: 1; Voltage - Input: Up to 35V; Supplier 1: Digi-Key; Supplier Part Number 1: LM7806CT-ND; Manufacturer Part Number: LM7806CT; RoHS: RoHS Compliant; Category: Integrated Circuits (ICs); Stock 1: 1467; Pricing 1: 1=0.7, 10=0.588, 25=0.5144, 100=0.441, 250=0.3822, 500=0.3234, 1000=0.2499, 2500=0.22785, 5000=0.21315 (USD); Packaging: Tube; Current - Limit (Min): -; Operating Temperature: -40°C ~ 125°C; Mounting Type: Through Hole; Package / Case: TO-220-3; Supplier Device Package: TO-220-3; ComponentLink1URL: http://www.fairchildsemi.com/datasheets/LM/LM7805.pdf; ComponentLink1Description: http://www.fairchildsemi.com/datasheets/LM/LM7805.pdf
footprint TO-220/123 (TO, Thru-Hole, Vertical, Heatsink Mounted; 3 In-Line Leads; Pitch 2.54 mm)
pins: 1 IN, 2 GND, 3 OUT

## LM7808CT
designator U?
Positive 8 V Regulator; Manufacturer: Fairchild Semiconductor; Regulator Topology: Positive Fixed; Voltage - Output: 8V; Current - Output: 1A; Voltage - Dropout (Typical): 2V @ 1A; Number of Regulators: 1; Voltage - Input: Up to 35V; Supplier 1: Digi-Key; Supplier Part Number 1: LM7808CTFS-ND; Manufacturer Part Number: LM7808CT; RoHS: RoHS Compliant; Category: Integrated Circuits (ICs); Stock 1: 467; Pricing 1: 1=0.7, 10=0.588, 25=0.5144, 100=0.441, 250=0.3822, 500=0.3234, 1000=0.2499, 2500=0.22785, 5000=0.21315 (USD); Packaging: Tube; Current - Limit (Min): -; Operating Temperature: -40°C ~ 125°C; Mounting Type: Through Hole; Package / Case: TO-220-3; Supplier Device Package: TO-220-3; ComponentLink1URL: http://www.fairchildsemi.com/datasheets/LM/LM7805.pdf; ComponentLink1Description: http://www.fairchildsemi.com/datasheets/LM/LM7805.pdf
footprint TO-220/123 (TO, Thru-Hole, Vertical, Heatsink Mounted; 3 In-Line Leads; Pitch 2.54 mm)
pins: 1 IN, 2 GND, 3 OUT

## LM7809CT
designator U?
Positive 9 V Regulator; Manufacturer: Fairchild Semiconductor; Regulator Topology: Positive Fixed; Voltage - Output: 9V; Current - Output: 1A; Voltage - Dropout (Typical): 2V @ 1A; Number of Regulators: 1; Voltage - Input: Up to 35V; Supplier 1: Digi-Key; Supplier Part Number 1: LM7809CT-ND; Manufacturer Part Number: LM7809CT; RoHS: RoHS Compliant; Category: Integrated Circuits (ICs); Stock 1: 2149; Pricing 1: 1=0.6, 10=0.525, 25=0.4652, 100=0.405, 250=0.35252, 500=0.3, 1000=0.24, 2500=0.2175, 5000=0.2025 (USD); Packaging: Tube; Current - Limit (Min): -; Operating Temperature: -40°C ~ 125°C; Mounting Type: Through Hole; Package / Case: TO-220-3; Supplier Device Package: TO-220-3; ComponentLink1URL: http://www.fairchildsemi.com/datasheets/LM/LM7805.pdf; ComponentLink1Description: http://www.fairchildsemi.com/datasheets/LM/LM7805.pdf
footprint TO-220/123 (TO, Thru-Hole, Vertical, Heatsink Mounted; 3 In-Line Leads; Pitch 2.54 mm)
pins: 1 IN, 2 GND, 3 OUT

## LM7810CT
designator U?
Positive 10 V Regulator; Manufacturer: Fairchild Semiconductor; Regulator Topology: Positive Fixed; Voltage - Output: 10V; Current - Output: 1A; Voltage - Dropout (Typical): 2V @ 1A; Number of Regulators: 1; Voltage - Input: Up to 35V; Supplier 1: Digi-Key; Supplier Part Number 1: LM7810CT-ND; Manufacturer Part Number: LM7810CT; RoHS: RoHS Compliant; Category: Integrated Circuits (ICs); Stock 1: 876; Pricing 1: 1=0.7, 10=0.588, 25=0.5144, 100=0.441, 250=0.3822, 500=0.3234, 1000=0.2499, 2500=0.22785, 5000=0.21315 (USD); Packaging: Tube; Current - Limit (Min): -; Operating Temperature: -40°C ~ 125°C; Mounting Type: Through Hole; Package / Case: TO-220-3; Supplier Device Package: TO-220-3; ComponentLink1URL: http://www.fairchildsemi.com/datasheets/LM/LM7805.pdf; ComponentLink1Description: http://www.fairchildsemi.com/datasheets/LM/LM7805.pdf
footprint TO-220/123 (TO, Thru-Hole, Vertical, Heatsink Mounted; 3 In-Line Leads; Pitch 2.54 mm)
pins: 1 IN, 2 GND, 3 OUT

## LM7812CT
designator U?
Positive 12 V Regulator; Manufacturer: Fairchild Semiconductor; Regulator Topology: Positive Fixed; Voltage - Output: 12V; Current - Output: 1A; Voltage - Dropout (Typical): 2V @ 1A; Number of Regulators: 1; Voltage - Input: Up to 35V; Supplier 1: Digi-Key; Supplier Part Number 1: LM7812CTFS-ND; Manufacturer Part Number: LM7812CT; RoHS: RoHS Compliant; Category: Integrated Circuits (ICs); Stock 1: 6613; Pricing 1: 1=0.7, 10=0.588, 25=0.5144, 100=0.441, 250=0.3822, 500=0.3234, 1000=0.2499, 2500=0.22785, 5000=0.21315 (USD); Packaging: Tube; Current - Limit (Min): -; Operating Temperature: -40°C ~ 125°C; Mounting Type: Through Hole; Package / Case: TO-220-3; Supplier Device Package: TO-220-3; ComponentLink1URL: http://www.fairchildsemi.com/datasheets/LM/LM7805.pdf; ComponentLink1Description: http://www.fairchildsemi.com/datasheets/LM/LM7805.pdf
footprint TO-220/123 (TO, Thru-Hole, Vertical, Heatsink Mounted; 3 In-Line Leads; Pitch 2.54 mm)
pins: 1 IN, 2 GND, 3 OUT

## LM7815CT
designator U?
Positive 15 V Regulator; Manufacturer: Fairchild Semiconductor; Regulator Topology: Positive Fixed; Voltage - Output: 15V; Current - Output: 1A; Voltage - Dropout (Typical): 2V @ 1A; Number of Regulators: 1; Voltage - Input: Up to 35V; Supplier 1: Digi-Key; Supplier Part Number 1: LM7815CTFS-ND; Manufacturer Part Number: LM7815CT; RoHS: RoHS Compliant; Category: Integrated Circuits (ICs); Stock 1: 1594; Pricing 1: 1=0.7, 10=0.588, 25=0.5144, 100=0.441, 250=0.3822, 500=0.3234, 1000=0.2499, 2500=0.22785, 5000=0.21315 (USD); Packaging: Tube; Current - Limit (Min): -; Operating Temperature: -40°C ~ 125°C; Mounting Type: Through Hole; Package / Case: TO-220-3; Supplier Device Package: TO-220-3; ComponentLink1URL: http://www.fairchildsemi.com/datasheets/LM/LM7805.pdf; ComponentLink1Description: http://www.fairchildsemi.com/datasheets/LM/LM7805.pdf
footprint TO-220/123 (TO, Thru-Hole, Vertical, Heatsink Mounted; 3 In-Line Leads; Pitch 2.54 mm)
pins: 1 IN, 2 GND, 3 OUT

## LM7818CT
designator U?
Positive 18 V Regulator; Manufacturer: Fairchild Semiconductor; Regulator Topology: Positive Fixed; Voltage - Output: 18V; Current - Output: 1A; Voltage - Dropout (Typical): 2V @ 1A; Number of Regulators: 1; Voltage - Input: Up to 35V; Supplier 1: Digi-Key; Supplier Part Number 1: LM7818CT-ND; Manufacturer Part Number: LM7818CT; RoHS: RoHS Compliant; Category: Integrated Circuits (ICs); Stock 1: 3844; Pricing 1: 1=0.7, 10=0.588, 25=0.5144, 100=0.441, 250=0.3822, 500=0.3234, 1000=0.2499, 2500=0.22785, 5000=0.21315 (USD); Packaging: Tube; Current - Limit (Min): -; Operating Temperature: -40°C ~ 125°C; Mounting Type: Through Hole; Package / Case: TO-220-3; Supplier Device Package: TO-220-3; ComponentLink1URL: http://www.fairchildsemi.com/datasheets/LM/LM7805.pdf; ComponentLink1Description: http://www.fairchildsemi.com/datasheets/LM/LM7805.pdf
footprint TO-220/123 (TO, Thru-Hole, Vertical, Heatsink Mounted; 3 In-Line Leads; Pitch 2.54 mm)
pins: 1 IN, 2 GND, 3 OUT

## LM7824CT
designator U?
Positive 24 V Regulator; Manufacturer: Fairchild Semiconductor; Regulator Topology: Positive Fixed; Voltage - Output: 24V; Current - Output: 1A; Voltage - Dropout (Typical): 2V @ 1A; Number of Regulators: 1; Voltage - Input: Up to 40V; Supplier 1: Digi-Key; Supplier Part Number 1: LM7824CTFS-ND; Manufacturer Part Number: LM7824CT; RoHS: RoHS Compliant; Category: Integrated Circuits (ICs); Stock 1: 1560; Pricing 1: 1=0.69, 10=0.58, 25=0.508, 100=0.4353, 250=0.37728, 500=0.31922, 1000=0.24667, 2500=0.2249, 5000=0.2104 (USD); Packaging: Tube; Current - Limit (Min): -; Operating Temperature: -40°C ~ 125°C; Mounting Type: Through Hole; Package / Case: TO-220-3; Supplier Device Package: TO-220-3; ComponentLink1URL: http://www.fairchildsemi.com/datasheets/LM/LM7805.pdf; ComponentLink1Description: http://www.fairchildsemi.com/datasheets/LM/LM7805.pdf
footprint TO-220/123 (TO, Thru-Hole, Vertical, Heatsink Mounted; 3 In-Line Leads; Pitch 2.54 mm)
pins: 1 IN, 2 GND, 3 OUT

## TPS79301
designator U?
Low-Noise, High PSRR, RF, 200-mA Low-Dropout Linear Regulators
footprint SOT-23/6 (Small Outline Transistor 6 leads)
pins: 1 IN, 2 GND, 3 EN, 4 NR, 5 FB, 6 OUT


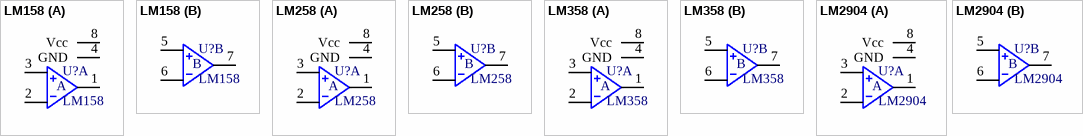
[diagram p24: symbols LM158 to LM2904]

## LM158
designator U?
Dual Operational Amplifier
footprint DIP08-300(100) (DIP; 8 Leads; Row Spacing 7.62 mm; Pitch 2.54 mm)
part A pins: 1 O1, 2 IN1-, 3 IN1+, 4 GND (power), 8 Vcc (power)
part B pins: 5 IN2+, 6 IN2-, 7 O2
part A text: A
part B text: B

## LM258
designator U?
Dual Operational Amplifier
footprint DIP08-300(100) (DIP; 8 Leads; Row Spacing 7.62 mm; Pitch 2.54 mm)
footprint SOIC08-150(50) (Plastic Small Outline 8 pinos)
footprint SOP08-2.9mm(0.65mm) (Small Outline Package 8 pin 2.9 mm large 0.65 mm pitch)
part A pins: 1 O1, 2 IN1-, 3 IN1+, 4 GND (power), 8 Vcc (power)
part B pins: 5 IN2+, 6 IN2-, 7 O2
part A text: A
part B text: B

## LM358
designator U?
Dual Operational Amplifier
footprint DIP08-300(100) (DIP; 8 Leads; Row Spacing 7.62 mm; Pitch 2.54 mm)
footprint SOIC08-150(50) (Plastic Small Outline 8 pinos)
footprint SOP08-2.9mm(0.65mm) (Small Outline Package 8 pin 2.9 mm large 0.65 mm pitch)
footprint SOP08-4.4mm(0.65mm) (Thin Shrink Small Outline Package 8 pin)
footprint SOP08-5.3mm(1.27mm) (Small Outline Package 8 pin)
part A pins: 1 O1, 2 IN1-, 3 IN1+, 4 GND (power), 8 Vcc (power)
part B pins: 5 IN2+, 6 IN2-, 7 O2
part A text: A
part B text: B

## LM2904
designator U?
Dual Operational Amplifier
footprint DIP08-300(100) (DIP; 8 Leads; Row Spacing 7.62 mm; Pitch 2.54 mm)
footprint SOIC08-150(50) (Plastic Small Outline 8 pinos)
footprint SOP08-2.9mm(0.65mm) (Small Outline Package 8 pin 2.9 mm large 0.65 mm pitch)
footprint SOP08-4.4mm(0.65mm) (Thin Shrink Small Outline Package 8 pin)
footprint SOP08-5.3mm(1.27mm) (Small Outline Package 8 pin)
part A pins: 1 O1, 2 IN1-, 3 IN1+, 4 GND (power), 8 Vcc (power)
part B pins: 5 IN2+, 6 IN2-, 7 O2
part A text: A
part B text: B


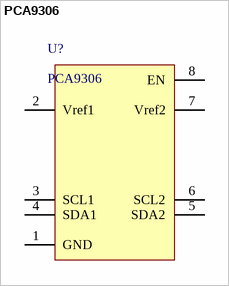
[diagram p25: symbol PCA9306]

## PCA9306
designator U?
Dual Bidirectional I2C Bus and SMBus Voltage-Level Translator; Reference Voltage (Vref): 0 - 5.5 V
footprint SOP08-2.9mm(0.65mm) (Small Outline Package 8 pin 2.9 mm large 0.65 mm pitch)
pins: 1 GND, 2 Vref1, 3 SCL1, 4 SDA1, 5 SDA2, 6 SCL2, 7 Vref2, 8 EN


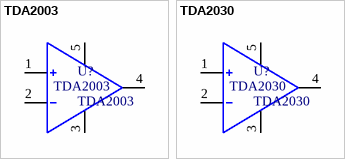
[diagram p26: symbols TDA2003 to TDA2030]

## TDA2003
designator U?
10 W Car Radio Audio Amplifier
footprint TO-220-5 (TO, Thru-Hole, Vertical, Heatsink Mounted; 5 Zig-Zag Leads; Pitch 1.7 mm)
pins: 1 IN+, 2 IN-, 3 GND (power), 4 OUT, 5 Vs (power)

## TDA2030
designator U?
14 W Hi-Fi Audio Amplifier; Manufacturer: STMicroelectronics; Manufacturer Part Number: TDA2030AV; Description: Audio Amplifiers 18W Hi-Fi Amplifier; Input Type: Differential; Output Current: 3500 mA; Output Power: 18 W; Supply Current: 80 mA; Supply Type: Dual; Gain: 80 dB; Number of Channels: 1 Channel; THD plus Noise: 0.5 %; Audio Load Resistance: 8 Ohm; Class: Class-AB; Ib - Input Bias Current: 2 uA; Pd - Power Dissipation: 20000 mW; PSRR - Power Supply Rejection Ratio: 54 dB; Vos - Input Offset Voltage: 15 V; Product Status: Obsolete; Supplier 1: Mouser; Supplier Part Number 1: 511-TDA2030AV; RoHS: RoHS Compliant; Category: Audio Amplifiers; Stock 1: 0; Package / Case: Pentawatt; Packaging: Tube; Product: Audio Amplifiers; Series: TDA2030A; Type: 1-Channel Mono; Brand: STMicroelectronics; Mounting Style: Through Hole; Maximum Operating Temperature: + 150 C; Minimum Operating Temperature: - 40 C; Product Category: Audio Integrated Circuits; Standard Pack Qty: 50; RoHS - Mouser: Y; Minimum Order Quantity: 1; Reeling: False; ComponentLink1URL: http://www.mouser.com/ds/2/389/stmicroelectronics_cd00000129-329572.pdf; ComponentLink1Description: http://www.mouser.com/ds/2/389/stmicroelectronics_cd00000129-329572.pdf
footprint TO-220-5 (TO, Thru-Hole, Vertical, Heatsink Mounted; 5 Zig-Zag Leads; Pitch 1.7 mm)
pins: 1 IN+, 2 IN-, 3 GND (power), 4 OUT, 5 Vs (power)